# Altium integrated library VIETTIEN.IntLib: 150 symbols (part 6 of 7)

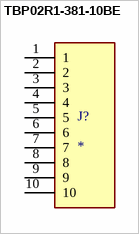
[diagram p115: symbol TBP02R1-381-10BE]

## TBP02R1-381-10BE
designator J?
2â€“24 Ð¿Ð¾Ð»ÑŽÑÐ°, Ð¿Ð¾Ð´ÐºÐ»ÑŽÑ‡Ð°ÐµÐ¼Ñ‹Ðµ, Ñ Ñ€Ð¾Ð·ÐµÑ‚ÐºÐ¾Ð¹, Ð³Ð¾Ñ€Ð¸Ð·Ð¾Ð½Ñ‚Ð°Ð»ÑŒÐ½Ñ‹Ðµ, Ñ ÑˆÐ°Ð³Ð¾Ð¼ 3,81, ÐºÐ»ÐµÐ¼Ð¼Ð½Ð°Ñ ÐºÐ¾Ð»Ð¾Ð´ÐºÐ°; MF: Same Sky; MP: TBP02R1-381-10BE; SnapEDA_Link: https://www.snapeda.com/parts/TBP02R1-381-10BE/Same+Sky/view-part/?ref=snap; Package: None; Value: *; Check_prices: https://www.snapeda.com/parts/TBP02R1-381-10BE/Same+Sky/view-part/?ref=eda
footprint CUI_TBP02R1-381-10BE
pins: 1, 2, 3, 4, 5, 6, 7, 8, 9, 10


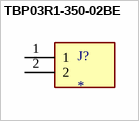
[diagram p116: symbol TBP03R1-350-02BE]

## TBP03R1-350-02BE
designator J?
2~24 Poles, Pluggable, Receptacle, Horizontal, 3.50 Pitch, Terminal Block Connector; MF: Same Sky; MP: TBP03R1-350-02BE; SnapEDA_Link: https://www.snapeda.com/parts/TBP03R1-350-02BE/Same+Sky/view-part/?ref=snap; Package: None; Value: *; Check_prices: https://www.snapeda.com/parts/TBP03R1-350-02BE/Same+Sky/view-part/?ref=eda
footprint CUI_TBP03R1-350-02BE
pins: 1, 2


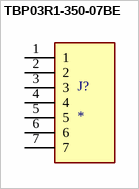
[diagram p117: symbol TBP03R1-350-07BE]

## TBP03R1-350-07BE
designator J?
2~24 Poles, Pluggable, Receptacle, Horizontal, 3.50 Pitch, Terminal Block Connector; MF: Same Sky; MP: TBP03R1-350-07BE; SnapEDA_Link: https://www.snapeda.com/parts/TBP03R1-350-07BE/Same+Sky/view-part/?ref=snap; Package: None; Value: *; Check_prices: https://www.snapeda.com/parts/TBP03R1-350-07BE/Same+Sky/view-part/?ref=eda
footprint CUI_TBP03R1-350-07BE
pins: 1, 2, 3, 4, 5, 6, 7


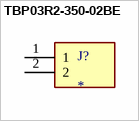
[diagram p118: symbol TBP03R2-350-02BE]

## TBP03R2-350-02BE
designator J?
2~24 Poles, Pluggable, Receptacle, Vertical, 3.50 Pitch, Terminal Block Connector; MF: Same Sky; MP: TBP03R2-350-02BE; SnapEDA_Link: https://www.snapeda.com/parts/TBP03R2-350-02BE/Same+Sky/view-part/?ref=snap; Package: None; Value: *; Check_prices: https://www.snapeda.com/parts/TBP03R2-350-02BE/Same+Sky/view-part/?ref=eda
footprint CUI_TBP03R2-350-02BE
pins: 1, 2


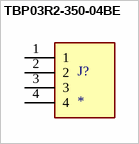
[diagram p119: symbol TBP03R2-350-04BE]

## TBP03R2-350-04BE
designator J?
2~24 Poles, Pluggable, Receptacle, Vertical, 3.50 Pitch, Terminal Block Connector; MF: Same Sky; MP: TBP03R2-350-04BE; SnapEDA_Link: https://www.snapeda.com/parts/TBP03R2-350-04BE/Same+Sky/view-part/?ref=snap; Package: None; Value: *; Check_prices: https://www.snapeda.com/parts/TBP03R2-350-04BE/Same+Sky/view-part/?ref=eda
footprint CUI_TBP03R2-350-04BE
pins: 1, 2, 3, 4


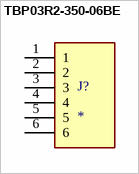
[diagram p120: symbol TBP03R2-350-06BE]

## TBP03R2-350-06BE
designator J?
2~24 Poles, Pluggable, Receptacle, Vertical, 3.50 Pitch, Terminal Block Connector; MF: Same Sky; MP: TBP03R2-350-06BE; SnapEDA_Link: https://www.snapeda.com/parts/TBP03R2-350-06BE/Same+Sky/view-part/?ref=snap; Package: None; Value: *; Check_prices: https://www.snapeda.com/parts/TBP03R2-350-06BE/Same+Sky/view-part/?ref=eda
footprint CUI_TBP03R2-350-06BE
pins: 1, 2, 3, 4, 5, 6


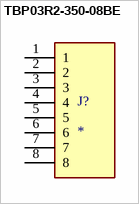
[diagram p121: symbol TBP03R2-350-08BE]

## TBP03R2-350-08BE
designator J?
2~24 Poles, Pluggable, Receptacle, Vertical, 3.50 Pitch, Terminal Block Connector; MF: Same Sky; MP: TBP03R2-350-08BE; SnapEDA_Link: https://www.snapeda.com/parts/TBP03R2-350-08BE/Same+Sky/view-part/?ref=snap; Package: None; Value: *; Check_prices: https://www.snapeda.com/parts/TBP03R2-350-08BE/Same+Sky/view-part/?ref=eda
footprint CUI_TBP03R2-350-08BE
pins: 1, 2, 3, 4, 5, 6, 7, 8


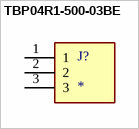
[diagram p122: symbol TBP04R1-500-03BE]

## TBP04R1-500-03BE
designator J?
Terminal Block - Domino - 3 pin; MF: Same Sky; MP: TBP04R1-500-03BE; SnapEDA_Link: https://www.snapeda.com/parts/TBP04R1-500-03BE/Same+Sky/view-part/?ref=snap; Package: None; Value: *; Check_prices: https://www.snapeda.com/parts/TBP04R1-500-03BE/Same+Sky/view-part/?ref=eda
footprint CUI_TBP04R1-500-03BE
pins: 1, 2, 3


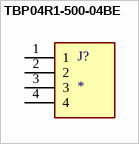
[diagram p123: symbol TBP04R1-500-04BE]

## TBP04R1-500-04BE
designator J?
2~24 Poles, Pluggable, Receptacle, Horizontal, 5.0 Pitch, Terminal Block Connector; MF: Same Sky; MP: TBP04R1-500-04BE; SnapEDA_Link: https://www.snapeda.com/parts/TBP04R1-500-04BE/Same+Sky/view-part/?ref=snap; Package: None; Value: *; Check_prices: https://www.snapeda.com/parts/TBP04R1-500-04BE/Same+Sky/view-part/?ref=eda
footprint CUI_TBP04R1-500-04BE
pins: 1, 2, 3, 4


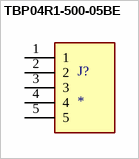
[diagram p124: symbol TBP04R1-500-05BE]

## TBP04R1-500-05BE
designator J?
2~24 Poles, Pluggable, Receptacle, Horizontal, 5.0 Pitch, Terminal Block Connector; MF: Same Sky; MP: TBP04R1-500-05BE; SnapEDA_Link: https://www.snapeda.com/parts/TBP04R1-500-05BE/Same+Sky/view-part/?ref=snap; Package: None; Value: *; Check_prices: https://www.snapeda.com/parts/TBP04R1-500-05BE/Same+Sky/view-part/?ref=eda
footprint CUI_TBP04R1-500-05BE
pins: 1, 2, 3, 4, 5


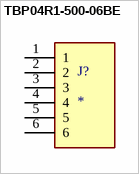
[diagram p125: symbol TBP04R1-500-06BE]

## TBP04R1-500-06BE
designator J?
2~24 Poles, Pluggable, Receptacle, Horizontal, 5.0 Pitch, Terminal Block Connector; MF: Same Sky; MP: TBP04R1-500-06BE; SnapEDA_Link: https://www.snapeda.com/parts/TBP04R1-500-06BE/Same+Sky/view-part/?ref=snap; Package: None; Value: *; Check_prices: https://www.snapeda.com/parts/TBP04R1-500-06BE/Same+Sky/view-part/?ref=eda
footprint CUI_TBP04R1-500-06BE
pins: 1, 2, 3, 4, 5, 6


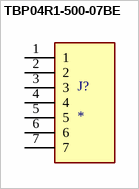
[diagram p126: symbol TBP04R1-500-07BE]

## TBP04R1-500-07BE
designator J?
2~24 Poles, Pluggable, Receptacle, Horizontal, 5.0 Pitch, Terminal Block Connector; MF: Same Sky; MP: TBP04R1-500-07BE; SnapEDA_Link: https://www.snapeda.com/parts/TBP04R1-500-07BE/Same+Sky/view-part/?ref=snap; Package: None; Value: *; Check_prices: https://www.snapeda.com/parts/TBP04R1-500-07BE/Same+Sky/view-part/?ref=eda
footprint CUI_TBP04R1-500-07BE
pins: 1, 2, 3, 4, 5, 6, 7


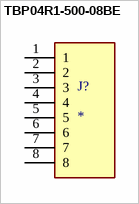
[diagram p127: symbol TBP04R1-500-08BE]

## TBP04R1-500-08BE
designator J?
2~24 Poles, Pluggable, Receptacle, Horizontal, 5.0 Pitch, Terminal Block Connector; MF: Same Sky; MP: TBP04R1-500-08BE; SnapEDA_Link: https://www.snapeda.com/parts/TBP04R1-500-08BE/Same+Sky/view-part/?ref=snap; Package: None; Value: *; Check_prices: https://www.snapeda.com/parts/TBP04R1-500-08BE/Same+Sky/view-part/?ref=eda
footprint CUI_TBP04R1-500-08BE
pins: 1, 2, 3, 4, 5, 6, 7, 8


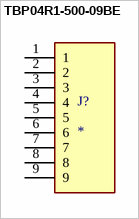
[diagram p128: symbol TBP04R1-500-09BE]

## TBP04R1-500-09BE
designator J?
2~24 Poles, Pluggable, Receptacle, Horizontal, 5.0 Pitch, Terminal Block Connector; MF: Same Sky; MP: TBP04R1-500-09BE; SnapEDA_Link: https://www.snapeda.com/parts/TBP04R1-500-09BE/Same+Sky/view-part/?ref=snap; Package: None; Value: *; Check_prices: https://www.snapeda.com/parts/TBP04R1-500-09BE/Same+Sky/view-part/?ref=eda
footprint CUI_TBP04R1-500-09BE
pins: 1, 2, 3, 4, 5, 6, 7, 8, 9


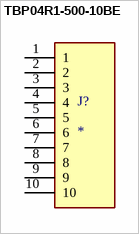
[diagram p129: symbol TBP04R1-500-10BE]

## TBP04R1-500-10BE
designator J?
2~24 Poles, Pluggable, Receptacle, Horizontal, 5.0 Pitch, Terminal Block Connector; MF: Same Sky; MP: TBP04R1-500-10BE; SnapEDA_Link: https://www.snapeda.com/parts/TBP04R1-500-10BE/Same+Sky/view-part/?ref=snap; Package: None; Value: *; Check_prices: https://www.snapeda.com/parts/TBP04R1-500-10BE/Same+Sky/view-part/?ref=eda
footprint CUI_TBP04R1-500-10BE
pins: 1, 2, 3, 4, 5, 6, 7, 8, 9, 10


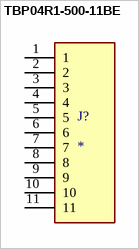
[diagram p130: symbol TBP04R1-500-11BE]

## TBP04R1-500-11BE
designator J?
2~24 Poles, Pluggable, Receptacle, Horizontal, 5.0 Pitch, Terminal Block Connector; MF: Same Sky; MP: TBP04R1-500-11BE; SnapEDA_Link: https://www.snapeda.com/parts/TBP04R1-500-11BE/Same+Sky/view-part/?ref=snap; Package: None; Value: *; Check_prices: https://www.snapeda.com/parts/TBP04R1-500-11BE/Same+Sky/view-part/?ref=eda
footprint CUI_TBP04R1-500-11BE
pins: 1, 2, 3, 4, 5, 6, 7, 8, 9, 10, 11


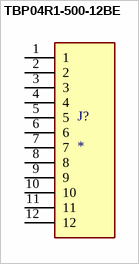
[diagram p131: symbol TBP04R1-500-12BE]

## TBP04R1-500-12BE
designator J?
2~24 Poles, Pluggable, Receptacle, Horizontal, 5.0 Pitch, Terminal Block Connector; MF: Same Sky; MP: TBP04R1-500-12BE; SnapEDA_Link: https://www.snapeda.com/parts/TBP04R1-500-12BE/Same+Sky/view-part/?ref=snap; Package: None; Value: *; Check_prices: https://www.snapeda.com/parts/TBP04R1-500-12BE/Same+Sky/view-part/?ref=eda
footprint CUI_TBP04R1-500-12BE
pins: 1, 2, 3, 4, 5, 6, 7, 8, 9, 10, 11, 12


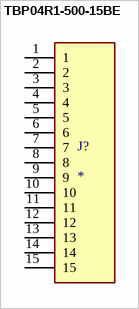
[diagram p132: symbol TBP04R1-500-15BE]

## TBP04R1-500-15BE
designator J?
2~24 Poles, Pluggable, Receptacle, Horizontal, 5.0 Pitch, Terminal Block Connector; MF: Same Sky; MP: TBP04R1-500-15BE; SnapEDA_Link: https://www.snapeda.com/parts/TBP04R1-500-15BE/Same+Sky/view-part/?ref=snap; Package: None; Value: *; Check_prices: https://www.snapeda.com/parts/TBP04R1-500-15BE/Same+Sky/view-part/?ref=eda
footprint CUI_TBP04R1-500-15BE
pins: 1, 2, 3, 4, 5, 6, 7, 8, 9, 10, 11, 12, 13, 14, 15


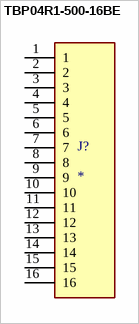
[diagram p133: symbol TBP04R1-500-16BE]

## TBP04R1-500-16BE
designator J?
2~24 Poles, Pluggable, Receptacle, Horizontal, 5.0 Pitch, Terminal Block Connector; MF: Same Sky; MP: TBP04R1-500-16BE; SnapEDA_Link: https://www.snapeda.com/parts/TBP04R1-500-16BE/Same+Sky/view-part/?ref=snap; Package: None; Value: *; Check_prices: https://www.snapeda.com/parts/TBP04R1-500-16BE/Same+Sky/view-part/?ref=eda
footprint CUI_TBP04R1-500-16BE
pins: 1, 2, 3, 4, 5, 6, 7, 8, 9, 10, 11, 12, 13, 14, 15, 16


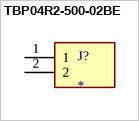
[diagram p134: symbol TBP04R2-500-02BE]

## TBP04R2-500-02BE
designator J?
2~24 Poles, Pluggable, Receptacle, Vertical, 5.0 Pitch, Terminal Block Connector; MF: Same Sky; MP: TBP04R2-500-02BE; SnapEDA_Link: https://www.snapeda.com/parts/TBP04R2-500-02BE/Same+Sky/view-part/?ref=snap; Package: None; Value: *; Check_prices: https://www.snapeda.com/parts/TBP04R2-500-02BE/Same+Sky/view-part/?ref=eda
footprint CUI_TBP04R2-500-02BE
pins: 1, 2


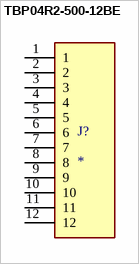
[diagram p135: symbol TBP04R2-500-12BE]

## TBP04R2-500-12BE
designator J?
2~24 Poles, Pluggable, Receptacle, Vertical, 5.0 Pitch, Terminal Block Connector; MF: Same Sky; MP: TBP04R2-500-12BE; SnapEDA_Link: https://www.snapeda.com/parts/TBP04R2-500-12BE/Same+Sky/view-part/?ref=snap; Package: None; Value: *; Check_prices: https://www.snapeda.com/parts/TBP04R2-500-12BE/Same+Sky/view-part/?ref=eda
footprint CUI_TBP04R2-500-12BE
pins: 1, 2, 3, 4, 5, 6, 7, 8, 9, 10, 11, 12


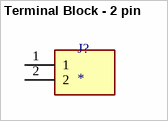
[diagram p136: symbol Terminal Block - 2 pin]

## Terminal Block - 2 pin
designator J?
Terminal Block - Domino - 2 pin; MF: Same Sky; MP: TBP04R1-500-02BE; SnapEDA_Link: https://www.snapeda.com/parts/TBP04R1-500-02BE/Same+Sky/view-part/?ref=snap; Package: None; Value: *; Check_prices: https://www.snapeda.com/parts/TBP04R1-500-02BE/Same+Sky/view-part/?ref=eda
footprint CUI_TBP04R1-500-02BE
pins: 1, 2


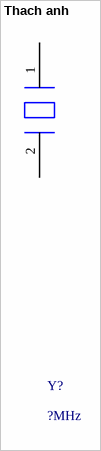
[diagram p137: symbol Thach anh]

## Thach anh
designator Y?, comment ?MHz
Crystal For all Crystal 2pin.
footprint CRY_HC_49_S
pins: 1, 2
